# Altium footprint library 2020-05-17_11-05-21.PcbLib: 3 footprints
Each footprint in its own frame and in the unit in brackets; x right, y up, seen from the top. Pads: shape width x height; smd on the part's side, far side on the other; paste and mask are expansions set on the pad; w line width, h text height; cw(c..) or ccw(c..) is an arc to the next point about the centre after c.
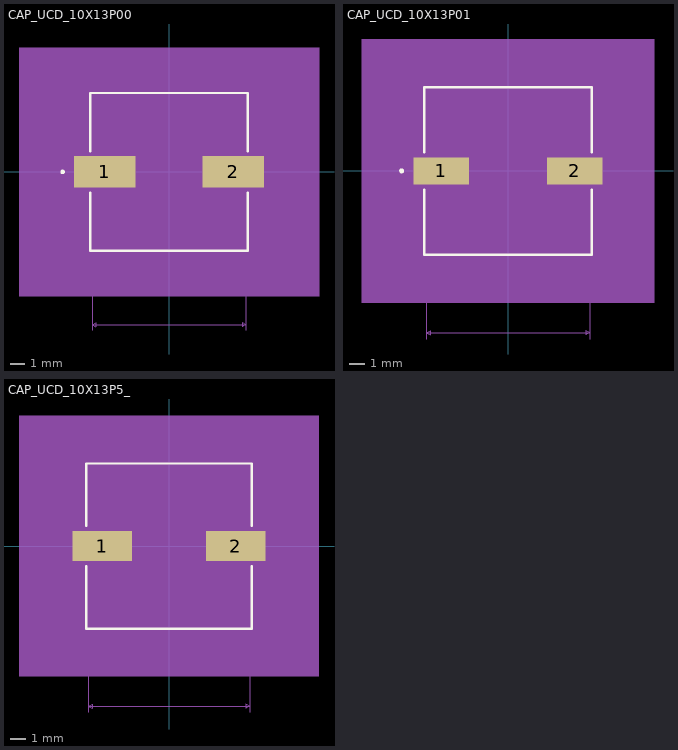
[diagram p0: the footprints below, top view; thin cyan lines are the x and y axes]

## CAP_UCD_10X13P00 [mil]
pads (2):
  rect 162x83 smd paste+0 mask+0: 1(-169.5,0) 2(169.5,0)
Top Overlay:
  circle w6: c-280.5,0 r3
  lines w6: -208,-54.6 -208,-208 208,-208 208,-54.6 ; -208,54.6 -208,208 208,208 208,54.6
Mechanical 5:
  region: 395.5,-328 -395.5,-328 -395.5,328 395.5,328
Mechanical 7:
  lines w1: -318,-203 -203,-203 -203,-418 ; -318,203 -203,203 ; -272.5,-303 -222.5,-303 ; -222.5,-318 -222.5,-51.5 ; -222.5,51.5 -222.5,318 ; -88.5,-318 -88.5,-31.5 ; -38.5,-303 -88.5,-303 ; 203,-418 203,-203 ; 222.5,51.5 222.5,318 ; 260.5,-21.5 365.5,-21.5 ; 260.5,21.5 365.5,21.5 ; 350.5,-71.5 350.5,-21.5 ; 350.5,71.5 350.5,21.5 ; -303,-203 -303,203 ; -303,-203 -308,-193 -298,-193 -303,-203 ; -303,203 -308,193 -298,193 -303,203 ; -222.5,-303 -232.5,-298 -232.5,-308 -222.5,-303 ; -222.5,303 222.5,303 ; -222.5,303 -212.5,308 -212.5,298 -222.5,303 ; -203,-403 203,-403 ; -203,-403 -193,-398 -193,-408 -203,-403 ; -88.5,-303 -78.5,-298 -78.5,-308 -88.5,-303 ; 203,-403 193,-398 193,-408 203,-403 ; 222.5,303 212.5,308 212.5,298 222.5,303 ; 350.5,-21.5 345.5,-31.5 355.5,-31.5 350.5,-21.5 ; 350.5,21.5 345.5,31.5 355.5,31.5 350.5,21.5
  text "Default Padstyle: RX162Y83D0T" at -362.5,-433.5 h50
  text "Alternate 1 Padstyle: OX60Y90D30P" at -412.5,-533.5 h50
  text "Alternate 2 Padstyle: OX90Y60D30P" at -412.5,-633.5 h50
  text "0.043in/1.092mm" at 370.5,-12.5 h25
  text "0.445in/11.303mm" at -100,323 h25
  text "0.406in/10.312mm" at -523,-12.5 h25
  text "0.134in/3.404mm" at -249.25,-348 h25
  text "0.406in/10.312mm" at -100,-448 h25
Mechanical 13:
  circle w0: c-183,0 r3
  lines w1: -203,-101.5 -101.5,-203 ; -203,101.5 -101.5,203 ; -203,-203 203,-203 203,203 -203,203 -203,-203
Mechanical 15:
  region: -223,-61.5 -270.5,-61.5 -270.5,61.5 -223,61.5 -223,223 223,223 223,61.5 270.5,61.5 270.5,-61.5 223,-61.5 223,-223 -223,-223
  lines w6: -270.5,-61.5 -270.5,61.5 -223,61.5 -223,223 223,223 223,61.5 270.5,61.5 270.5,-61.5 223,-61.5 223,-223 -223,-223 -223,-61.5 -270.5,-61.5
3D body: height 10, standoff 0, extent 0,0 10,10

## CAP_UCD_10X13P01 [mil]
pads (2):
  rect 138x67 smd paste+0 mask+0: 1(-165.5,0) 2(165.5,0)
Top Overlay:
  circle w6: c-264.5,0 r3
  lines w6: -208,-46.6 -208,-208 208,-208 208,-46.6 ; -208,46.6 -208,208 208,208 208,46.6
Mechanical 5:
  region: 363.5,-328 -363.5,-328 -363.5,328 363.5,328
Mechanical 7:
  lines w1: -318,-203 -203,-203 -203,-418 ; -318,203 -203,203 ; -272.5,-303 -222.5,-303 ; -222.5,-318 -222.5,-43.5 ; -222.5,43.5 -222.5,318 ; -88.5,-318 -88.5,-23.5 ; -38.5,-303 -88.5,-303 ; 203,-418 203,-203 ; 222.5,43.5 222.5,318 ; 244.5,-21.5 349.5,-21.5 ; 244.5,21.5 349.5,21.5 ; 334.5,-71.5 334.5,-21.5 ; 334.5,71.5 334.5,21.5 ; -303,-203 -303,203 ; -303,-203 -308,-193 -298,-193 -303,-203 ; -303,203 -308,193 -298,193 -303,203 ; -222.5,-303 -232.5,-298 -232.5,-308 -222.5,-303 ; -222.5,303 222.5,303 ; -222.5,303 -212.5,308 -212.5,298 -222.5,303 ; -203,-403 203,-403 ; -203,-403 -193,-398 -193,-408 -203,-403 ; -88.5,-303 -78.5,-298 -78.5,-308 -88.5,-303 ; 203,-403 193,-398 193,-408 203,-403 ; 222.5,303 212.5,308 212.5,298 222.5,303 ; 334.5,-21.5 329.5,-31.5 339.5,-31.5 334.5,-21.5 ; 334.5,21.5 329.5,31.5 339.5,31.5 334.5,21.5
  text "Default Padstyle: RX138Y67D0T" at -362.5,-441.5 h50
  text "Alternate 1 Padstyle: OX60Y90D30P" at -412.5,-541.5 h50
  text "Alternate 2 Padstyle: OX90Y60D30P" at -412.5,-641.5 h50
  text "0.043in/1.092mm" at 354.5,-12.5 h25
  text "0.445in/11.303mm" at -100,323 h25
  text "0.406in/10.312mm" at -523,-12.5 h25
  text "0.134in/3.404mm" at -249.25,-348 h25
  text "0.406in/10.312mm" at -100,-448 h25
Mechanical 13:
  circle w0: c-183,0 r3
  lines w1: -203,-101.5 -101.5,-203 ; -203,101.5 -101.5,203 ; -203,-203 203,-203 203,203 -203,203 -203,-203
Mechanical 15:
  region: -207,-37.5 -238.5,-37.5 -238.5,37.5 -207,37.5 -207,207 207,207 207,37.5 238.5,37.5 238.5,-37.5 207,-37.5 207,-207 -207,-207
  lines w6: -238.5,-37.5 -238.5,37.5 -207,37.5 -207,207 207,207 207,37.5 238.5,37.5 238.5,-37.5 207,-37.5 207,-207 -207,-207 -207,-37.5 -238.5,-37.5
3D body: height 10, standoff 0, extent 0,0 10,10

## CAP_UCD_10X13P5_ [mil]
pads (2):
  rect 150x75 smd paste+0 mask+0: 1(-167.5,0) 2(167.5,0)
Top Overlay:
  lines w6: -208,-50.6 -208,-208 208,-208 208,-50.6 ; -208,50.6 -208,208 208,208 208,50.6
Mechanical 5:
  region: 377.5,-328 -377.5,-328 -377.5,328 377.5,328
Mechanical 7:
  lines w1: -318,-203 -203,-203 -203,-418 ; -318,203 -203,203 ; -272.5,-303 -222.5,-303 ; -222.5,-318 -222.5,-47.5 ; -222.5,47.5 -222.5,318 ; -88.5,-318 -88.5,-27.5 ; -38.5,-303 -88.5,-303 ; 203,-418 203,-203 ; 222.5,47.5 222.5,318 ; 252.5,-21.5 357.5,-21.5 ; 252.5,21.5 357.5,21.5 ; 342.5,-71.5 342.5,-21.5 ; 342.5,71.5 342.5,21.5 ; -303,-203 -303,203 ; -303,-203 -308,-193 -298,-193 -303,-203 ; -303,203 -308,193 -298,193 -303,203 ; -222.5,-303 -232.5,-298 -232.5,-308 -222.5,-303 ; -222.5,303 222.5,303 ; -222.5,303 -212.5,308 -212.5,298 -222.5,303 ; -203,-403 203,-403 ; -203,-403 -193,-398 -193,-408 -203,-403 ; -88.5,-303 -78.5,-298 -78.5,-308 -88.5,-303 ; 203,-403 193,-398 193,-408 203,-403 ; 222.5,303 212.5,308 212.5,298 222.5,303 ; 342.5,-21.5 337.5,-31.5 347.5,-31.5 342.5,-21.5 ; 342.5,21.5 337.5,31.5 347.5,31.5 342.5,21.5
  text "Default Padstyle: RX150Y75D0T" at -362.5,-437.5 h50
  text "Alternate 1 Padstyle: OX60Y90D30P" at -412.5,-537.5 h50
  text "Alternate 2 Padstyle: OX90Y60D30P" at -412.5,-637.5 h50
  text "0.043in/1.092mm" at 362.5,-12.5 h25
  text "0.445in/11.303mm" at -100,323 h25
  text "0.406in/10.312mm" at -523,-12.5 h25
  text "0.134in/3.404mm" at -249.25,-348 h25
  text "0.406in/10.312mm" at -100,-448 h25
Mechanical 13:
  circle w0: c-183,0 r0
  lines w1: -203,-101.5 -101.5,-203 ; -203,101.5 -101.5,203 ; -203,-203 203,-203 203,203 -203,203 -203,-203
Mechanical 15:
  region: -213,-47.5 -252.5,-47.5 -252.5,47.5 -213,47.5 -213,213 213,213 213,47.5 252.5,47.5 252.5,-47.5 213,-47.5 213,-213 -213,-213
  lines w6: -252.5,-47.5 -252.5,47.5 -213,47.5 -213,213 213,213 213,47.5 252.5,47.5 252.5,-47.5 213,-47.5 213,-213 -213,-213 -213,-47.5 -252.5,-47.5
3D body: height 10, standoff 0, extent 0,0 10,10